# Altium footprint library Altium_Box_Header.PcbLib: 219 footprints (part 14 of 14)
Each footprint in its own frame and in the unit in brackets; x right, y up, seen from the top. Pads: shape width x height; smd on the part's side, far side on the other; paste and mask are expansions set on the pad; w line width, h text height; cw(c..) or ccw(c..) is an arc to the next point about the centre after c.
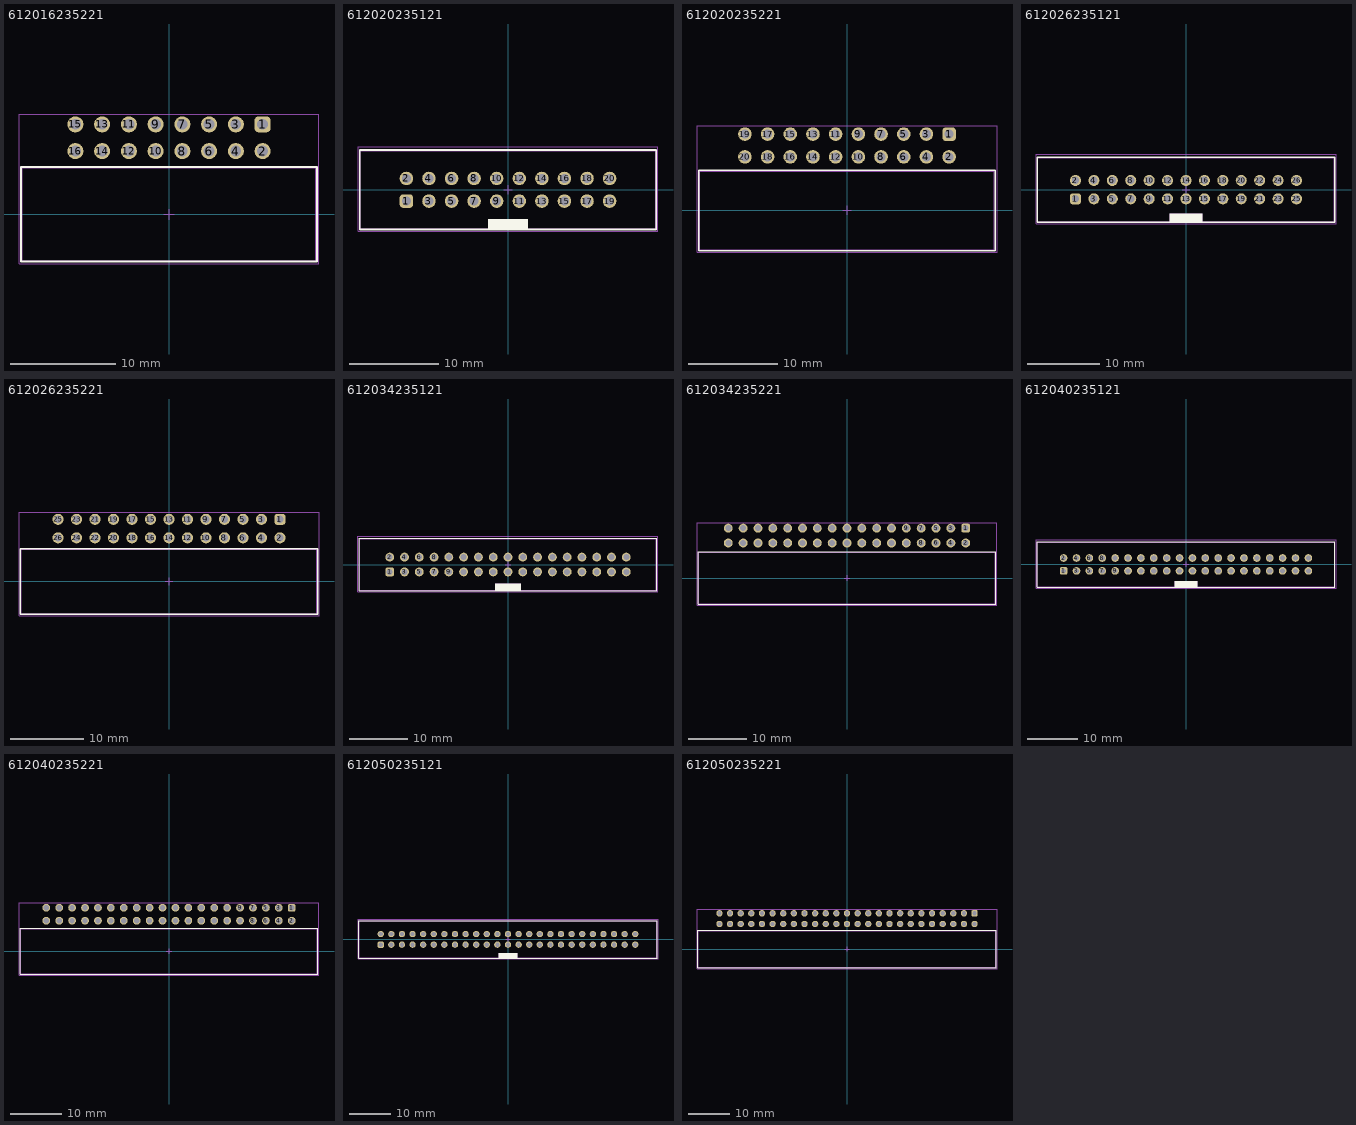
[diagram p13: the footprints below, top view; thin cyan lines are the x and y axes]

## 612016235221 [mm] "16 pins, right angled, gold plating, High Temperature"
height 9.05
pads (16):
  rrect50% 1.52x1.52 hole 1.02: 1(8.89,8.54)
  round 1.52 hole 1.02: 2(8.89,6) 3(6.35,8.54) 4(6.35,6) 5(3.81,8.54) 6(3.81,6) 7(1.27,8.54) 8(1.27,6) 9(-1.27,8.54) 10(-1.27,6) 11(-3.81,8.54) 12(-3.81,6) 13(-6.35,8.54) 14(-6.35,6) 15(-8.89,8.54) 16(-8.89,6)
Top Overlay:
  lines w0.2: -14.05,-4.5 -14.05,4.5 14.05,4.5 14.05,-4.5 -14.05,-4.5
Top Designator:
  text ".Designator" at -7.498,-0.5 h1.5
Top Component Outline:
  lines w0.1: -13.95,-4.4 13.95,-4.4 13.95,4.4 -13.95,4.4 -13.95,-4.4
Top 3D Body:
  lines w0.1: -13.95,-4.4 -13.95,4.4 13.95,4.4 13.95,-4.4 -13.95,-4.4
Top Courtyard:
  lines w0.05: -14.25,-4.7 14.25,-4.7 14.25,9.5 -14.25,9.5 -14.25,-4.7
Top Component Center:
  lines w0.05: -0.5,0 0.5,0 ; 0,-0.5 0,0.5
3D body "612016235221.stp": height 9.1, standoff -3.1, extent -13.99,-4.4 13.99,8.86

## 612020235121 [mm] "20 pins, straight, gold plating"
height 9.05
pads (20):
  rrect50% 1.52x1.52 hole 1.02: 1(-11.43,-1.27)
  round 1.52 hole 1.02: 2(-11.43,1.27) 3(-8.89,-1.27) 4(-8.89,1.27) 5(-6.35,-1.27) 6(-6.35,1.27) 7(-3.81,-1.27) 8(-3.81,1.27) 9(-1.27,-1.27) 10(-1.27,1.27) 11(1.27,-1.27) 12(1.27,1.27) 13(3.81,-1.27) 14(3.81,1.27) 15(6.35,-1.27) 16(6.35,1.27) 17(8.89,-1.27) 18(8.89,1.27) 19(11.43,-1.27) 20(11.43,1.27)
Top Overlay:
  rectangle: -2.25,-4.475 2.25,-3.275
  lines w0.2: -16.675,-4.475 16.675,-4.475 16.675,4.475 -16.675,4.475 -16.675,-4.475
Top Designator:
  text ".Designator" at -7.498,-0.5 h1.5
Top Component Outline:
  rectangle: -2.25,-4.4 2.25,-3.275
  lines w0.1: -16.6,-4.4 16.6,-4.4 16.6,4.4 -16.6,4.4 -16.6,-4.4
Top 3D Body:
  rectangle: -2.25,-4.4 2.25,-3.275
  lines w0.1: -16.6,-4.4 -16.6,4.4 16.6,4.4 16.6,-4.4 -16.6,-4.4
Top Courtyard:
  lines w0.05: -16.875,-4.675 16.875,-4.675 16.875,4.85 -16.875,4.85 -16.875,-4.675
Top Component Center:
  lines w0.05: -0.5,0 0.5,0 ; 0,-0.5 0,0.5
3D body "612020235121.stp": height 9.1, standoff -2.9, extent -16.53,-4.4 16.53,4.65

## 612020235221 [mm] "20 pins, right angled, gold plating, High Temperature"
height 9.05
pads (20):
  rrect50% 1.52x1.52 hole 1.02: 1(11.43,8.54)
  round 1.52 hole 1.02: 2(11.43,6) 3(8.89,8.54) 4(8.89,6) 5(6.35,8.54) 6(6.35,6) 7(3.81,8.54) 8(3.81,6) 9(1.27,8.54) 10(1.27,6) 11(-1.27,8.54) 12(-1.27,6) 13(-3.81,8.54) 14(-3.81,6) 15(-6.35,8.54) 16(-6.35,6) 17(-8.89,8.54) 18(-8.89,6) 19(-11.43,8.54) 20(-11.43,6)
Top Overlay:
  lines w0.2: -16.59,-4.5 16.59,-4.5 16.59,4.5 -16.59,4.5 -16.59,-4.5
Top Designator:
  text ".Designator" at -7.498,-0.5 h1.5
Top Component Outline:
  lines w0.1: -16.49,-4.4 -16.49,4.4 16.49,4.4 16.49,-4.4 -16.49,-4.4
Top 3D Body:
  lines w0.1: -16.49,-4.4 16.49,-4.4 16.49,4.4 -16.49,4.4 -16.49,-4.4
Top Courtyard:
  lines w0.05: -16.79,-4.7 -16.79,9.5 16.79,9.5 16.79,-4.7 -16.79,-4.7
Top Component Center:
  lines w0.05: -0.5,0 0.5,0 ; 0,-0.5 0,0.5
3D body "612020235221.stp": height 9.1, standoff -3.1, extent -16.53,-4.4 16.53,8.86

## 612026235121 [mm] "26 pins, straight, gold plating"
height 9.05
pads (26):
  rrect50% 1.52x1.52 hole 1.02: 1(-15.24,-1.27)
  round 1.52 hole 1.02: 2(-15.24,1.27) 3(-12.7,-1.27) 4(-12.7,1.27) 5(-10.16,-1.27) 6(-10.16,1.27) 7(-7.62,-1.27) 8(-7.62,1.27) 9(-5.08,-1.27) 10(-5.08,1.27) 11(-2.54,-1.27) 12(-2.54,1.27) 13(0,-1.27) 14(0,1.27) 15(2.54,-1.27) 16(2.54,1.27) 17(5.08,-1.27) 18(5.08,1.27) 19(7.62,-1.27) 20(7.62,1.27) 21(10.16,-1.27) 22(10.16,1.27) 23(12.7,-1.27) 24(12.7,1.27) 25(15.24,-1.27) 26(15.24,1.27)
Top Overlay:
  rectangle: -2.25,-4.475 2.25,-3.275
  lines w0.2: -20.485,-4.475 20.485,-4.475 20.485,4.475 -20.485,4.475 -20.485,-4.475
Top Designator:
  text ".Designator" at -7.498,-0.5 h1.5
Top Component Outline:
  rectangle: -2.25,-4.4 2.25,-3.275
  lines w0.1: -20.41,-4.4 20.41,-4.4 20.41,4.4 -20.41,4.4 -20.41,-4.4
Top 3D Body:
  rectangle: -2.25,-4.4 2.25,-3.275
  lines w0.1: -20.41,-4.4 -20.41,4.4 20.41,4.4 20.41,-4.4 -20.41,-4.4
Top Courtyard:
  lines w0.05: -20.685,-4.675 20.685,-4.675 20.685,4.85 -20.685,4.85 -20.685,-4.675
Top Component Center:
  lines w0.05: -0.5,0 0.5,0 ; 0,-0.5 0,0.5
3D body "612026235121.stp": height 9.1, standoff -2.9, extent -20.34,-4.4 20.34,4.65

## 612026235221 [mm] "26 pins, right angled, gold plating, High Temperature"
height 9.05
pads (26):
  rrect50% 1.52x1.52 hole 1.02: 1(15.24,8.54)
  round 1.52 hole 1.02: 2(15.24,6) 3(12.7,8.54) 4(12.7,6) 5(10.16,8.54) 6(10.16,6) 7(7.62,8.54) 8(7.62,6) 9(5.08,8.54) 10(5.08,6) 11(2.54,8.54) 12(2.54,6) 13(0,8.54) 14(0,6) 15(-2.54,8.54) 16(-2.54,6) 17(-5.08,8.54) 18(-5.08,6) 19(-7.62,8.54) 20(-7.62,6) 21(-10.16,8.54) 22(-10.16,6) 23(-12.7,8.54) 24(-12.7,6) 25(-15.24,8.54) 26(-15.24,6)
Top Overlay:
  lines w0.2: -20.4,-4.5 -20.4,4.5 20.4,4.5 20.4,-4.5 -20.4,-4.5
Top Designator:
  text ".Designator" at -7.498,-0.5 h1.5
Top Component Outline:
  lines w0.1: -20.3,-4.4 20.3,-4.4 20.3,4.4 -20.3,4.4 -20.3,-4.4
Top 3D Body:
  lines w0.1: -20.3,-4.4 -20.3,4.4 20.3,4.4 20.3,-4.4 -20.3,-4.4
Top Courtyard:
  lines w0.05: -20.6,-4.7 20.6,-4.7 20.6,9.5 -20.6,9.5 -20.6,-4.7
Top Component Center:
  lines w0.05: -0.5,0 0.5,0 ; 0,-0.5 0,0.5
3D body "612026235221.stp": height 9.1, standoff -3.1, extent -20.34,-4.4 20.34,8.86

## 612034235121 [mm] "34 pins, straight, gold plating"
height 9.05
pads (34):
  rrect50% 1.52x1.52 hole 1.02: 1(-20.32,-1.27)
  round 1.52 hole 1.02: 2(-20.32,1.27) 3(-17.78,-1.27) 4(-17.78,1.27) 5(-15.24,-1.27) 6(-15.24,1.27) 7(-12.7,-1.27) 8(-12.7,1.27) 9(-10.16,-1.27) 10(-10.16,1.27) 11(-7.62,-1.27) 12(-7.62,1.27) 13(-5.08,-1.27) 14(-5.08,1.27) 15(-2.54,-1.27) 16(-2.54,1.27) 17(0,-1.27) 18(0,1.27) 19(2.54,-1.27) 20(2.54,1.27) 21(5.08,-1.27) 22(5.08,1.27) 23(7.62,-1.27) 24(7.62,1.27) 25(10.16,-1.27) 26(10.16,1.27) 27(12.7,-1.27) 28(12.7,1.27) 29(15.24,-1.27) 30(15.24,1.27) 31(17.78,-1.27) 32(17.78,1.27) 33(20.32,-1.27) 34(20.32,1.27)
Top Overlay:
  rectangle: -2.25,-4.475 2.25,-3.275
  lines w0.2: -25.565,-4.475 25.565,-4.475 25.565,4.475 -25.565,4.475 -25.565,-4.475
Top Designator:
  text ".Designator" at -7.498,-0.5 h1.5
Top Component Outline:
  rectangle: -2.25,-4.4 2.25,-3.275
  lines w0.1: -25.49,-4.4 25.49,-4.4 25.49,4.4 -25.49,4.4 -25.49,-4.4
Top 3D Body:
  rectangle: -2.25,-4.4 2.25,-3.275
  lines w0.1: -25.49,-4.4 -25.49,4.4 25.49,4.4 25.49,-4.4 -25.49,-4.4
Top Courtyard:
  lines w0.05: -25.765,-4.675 25.765,-4.675 25.765,4.85 -25.765,4.85 -25.765,-4.675
Top Component Center:
  lines w0.05: -0.5,0 0.5,0 ; 0,-0.5 0,0.5
3D body "612034235121.stp": height 9.1, standoff -2.9, extent -25.42,-4.4 25.42,4.65

## 612034235221 [mm] "34 pins, right angled, gold plating, High Temperature"
height 9.05
pads (34):
  rrect50% 1.52x1.52 hole 1.02: 1(20.32,8.54)
  round 1.52 hole 1.02: 2(20.32,6) 3(17.78,8.54) 4(17.78,6) 5(15.24,8.54) 6(15.24,6) 7(12.7,8.54) 8(12.7,6) 9(10.16,8.54) 10(10.16,6) 11(7.62,8.54) 12(7.62,6) 13(5.08,8.54) 14(5.08,6) 15(2.54,8.54) 16(2.54,6) 17(0,8.54) 18(0,6) 19(-2.54,8.54) 20(-2.54,6) 21(-5.08,8.54) 22(-5.08,6) 23(-7.62,8.54) 24(-7.62,6) 25(-10.16,8.54) 26(-10.16,6) 27(-12.7,8.54) 28(-12.7,6) 29(-15.24,8.54) 30(-15.24,6) 31(-17.78,8.54) 32(-17.78,6) 33(-20.32,8.54) 34(-20.32,6)
Top Overlay:
  lines w0.2: -25.48,-4.5 -25.48,4.5 25.48,4.5 25.48,-4.5 -25.48,-4.5
Top Designator:
  text ".Designator" at -7.498,-0.5 h1.5
Top Component Outline:
  lines w0.1: -25.38,-4.4 25.38,-4.4 25.38,4.4 -25.38,4.4 -25.38,-4.4
Top 3D Body:
  lines w0.1: -25.38,-4.4 -25.38,4.4 25.38,4.4 25.38,-4.4 -25.38,-4.4
Top Courtyard:
  lines w0.05: -25.68,-4.7 25.68,-4.7 25.68,9.5 -25.68,9.5 -25.68,-4.7
Top Component Center:
  lines w0.05: -0.5,0 0.5,0 ; 0,-0.5 0,0.5
3D body "612034235221.stp": height 9.1, standoff -3.1, extent -25.42,-4.4 25.42,8.86

## 612040235121 [mm] "40 pins, straight, gold plating"
height 9.05
pads (40):
  rrect50% 1.52x1.52 hole 1.02: 1(-24.13,-1.27)
  round 1.52 hole 1.02: 2(-24.13,1.27) 3(-21.59,-1.27) 4(-21.59,1.27) 5(-19.05,-1.27) 6(-19.05,1.27) 7(-16.51,-1.27) 8(-16.51,1.27) 9(-13.97,-1.27) 10(-13.97,1.27) 11(-11.43,-1.27) 12(-11.43,1.27) 13(-8.89,-1.27) 14(-8.89,1.27) 15(-6.35,-1.27) 16(-6.35,1.27) 17(-3.81,-1.27) 18(-3.81,1.27) 19(-1.27,-1.27) 20(-1.27,1.27) 21(1.27,-1.27) 22(1.27,1.27) 23(3.81,-1.27) 24(3.81,1.27) 25(6.35,-1.27) 26(6.35,1.27) 27(8.89,-1.27) 28(8.89,1.27) 29(11.43,-1.27) 30(11.43,1.27) 31(13.97,-1.27) 32(13.97,1.27) 33(16.51,-1.27) 34(16.51,1.27) 35(19.05,-1.27) 36(19.05,1.27) 37(21.59,-1.27) 38(21.59,1.27) 39(24.13,-1.27) 40(24.13,1.27)
Top Overlay:
  rectangle: -2.25,-4.475 2.25,-3.275
  lines w0.2: -29.375,-4.475 29.375,-4.475 29.375,4.475 -29.375,4.475 -29.375,-4.475
Top Designator:
  text ".Designator" at -7.498,-0.5 h1.5
Top Component Outline:
  rectangle: -2.25,-4.4 2.25,-3.275
  lines w0.1: -29.3,-4.4 29.3,-4.4 29.3,4.4 -29.3,4.4 -29.3,-4.4
Top 3D Body:
  rectangle: -2.25,-4.4 2.25,-3.275
  lines w0.1: -29.3,-4.4 -29.3,4.4 29.3,4.4 29.3,-4.4 -29.3,-4.4
Top Courtyard:
  lines w0.05: -29.575,-4.675 29.575,-4.675 29.575,4.85 -29.575,4.85 -29.575,-4.675
Top Component Center:
  lines w0.05: -0.5,0 0.5,0 ; 0,-0.5 0,0.5
3D body "612040235121.stp": height 9.1, standoff -2.9, extent -29.23,-4.4 29.23,4.65

## 612040235221 [mm] "40 pins, right angled, gold plating, High Temperature"
height 9.05
pads (40):
  rrect50% 1.52x1.52 hole 1.02: 1(24.13,8.54)
  round 1.52 hole 1.02: 2(24.13,6) 3(21.59,8.54) 4(21.59,6) 5(19.05,8.54) 6(19.05,6) 7(16.51,8.54) 8(16.51,6) 9(13.97,8.54) 10(13.97,6) 11(11.43,8.54) 12(11.43,6) 13(8.89,8.54) 14(8.89,6) 15(6.35,8.54) 16(6.35,6) 17(3.81,8.54) 18(3.81,6) 19(1.27,8.54) 20(1.27,6) 21(-1.27,8.54) 22(-1.27,6) 23(-3.81,8.54) 24(-3.81,6) 25(-6.35,8.54) 26(-6.35,6) 27(-8.89,8.54) 28(-8.89,6) 29(-11.43,8.54) 30(-11.43,6) 31(-13.97,8.54) 32(-13.97,6) 33(-16.51,8.54) 34(-16.51,6) 35(-19.05,8.54) 36(-19.05,6) 37(-21.59,8.54) 38(-21.59,6) 39(-24.13,8.54) 40(-24.13,6)
Top Overlay:
  lines w0.2: -29.29,-4.5 -29.29,4.5 29.29,4.5 29.29,-4.5 -29.29,-4.5
Top Designator:
  text ".Designator" at -7.498,-0.5 h1.5
Top Component Outline:
  lines w0.1: -29.19,-4.4 29.19,-4.4 29.19,4.4 -29.19,4.4 -29.19,-4.4
Top 3D Body:
  lines w0.1: -29.19,-4.4 -29.19,4.4 29.19,4.4 29.19,-4.4 -29.19,-4.4
Top Courtyard:
  lines w0.05: -29.49,-4.7 29.49,-4.7 29.49,9.5 -29.49,9.5 -29.49,-4.7
Top Component Center:
  lines w0.05: -0.5,0 0.5,0 ; 0,-0.5 0,0.5
3D body "612040235221.stp": height 9.1, standoff -3.1, extent -29.23,-4.4 29.23,8.86

## 612050235121 [mm] "50 pins, straight, gold plating"
height 9.05
pads (50):
  rrect50% 1.52x1.52 hole 1.02: 1(-30.48,-1.27)
  round 1.52 hole 1.02: 2(-30.48,1.27) 3(-27.94,-1.27) 4(-27.94,1.27) 5(-25.4,-1.27) 6(-25.4,1.27) 7(-22.86,-1.27) 8(-22.86,1.27) 9(-20.32,-1.27) 10(-20.32,1.27) 11(-17.78,-1.27) 12(-17.78,1.27) 13(-15.24,-1.27) 14(-15.24,1.27) 15(-12.7,-1.27) 16(-12.7,1.27) 17(-10.16,-1.27) 18(-10.16,1.27) 19(-7.62,-1.27) 20(-7.62,1.27) 21(-5.08,-1.27) 22(-5.08,1.27) 23(-2.54,-1.27) 24(-2.54,1.27) 25(0,-1.27) 26(0,1.27) 27(2.54,-1.27) 28(2.54,1.27) 29(5.08,-1.27) 30(5.08,1.27) 31(7.62,-1.27) 32(7.62,1.27) 33(10.16,-1.27) 34(10.16,1.27) 35(12.7,-1.27) 36(12.7,1.27) 37(15.24,-1.27) 38(15.24,1.27) 39(17.78,-1.27) 40(17.78,1.27) 41(20.32,-1.27) 42(20.32,1.27) 43(22.86,-1.27) 44(22.86,1.27) 45(25.4,-1.27) 46(25.4,1.27) 47(27.94,-1.27) 48(27.94,1.27) 49(30.48,-1.27) 50(30.48,1.27)
Top Overlay:
  rectangle: -2.25,-4.475 2.25,-3.275
  lines w0.2: -35.725,-4.475 35.725,-4.475 35.725,4.475 -35.725,4.475 -35.725,-4.475
Top Designator:
  text ".Designator" at -7.498,-0.5 h1.5
Top Component Outline:
  rectangle: -2.25,-4.4 2.25,-3.275
  lines w0.1: -35.65,-4.4 35.65,-4.4 35.65,4.4 -35.65,4.4 -35.65,-4.4
Top 3D Body:
  rectangle: -2.25,-4.4 2.25,-3.275
  lines w0.1: -35.65,-4.4 -35.65,4.4 35.65,4.4 35.65,-4.4 -35.65,-4.4
Top Courtyard:
  lines w0.05: -35.925,-4.675 35.925,-4.675 35.925,4.85 -35.925,4.85 -35.925,-4.675
Top Component Center:
  lines w0.05: -0.5,0 0.5,0 ; 0,-0.5 0,0.5
3D body "612050235121.stp": height 9.1, standoff -2.9, extent -35.58,-4.4 35.58,4.65

## 612050235221 [mm] "50 pins, right angled, gold plating, High Temperature"
height 9.05
pads (50):
  rrect50% 1.52x1.52 hole 1.02: 1(30.48,8.54)
  round 1.52 hole 1.02: 2(30.48,6) 3(27.94,8.54) 4(27.94,6) 5(25.4,8.54) 6(25.4,6) 7(22.86,8.54) 8(22.86,6) 9(20.32,8.54) 10(20.32,6) 11(17.78,8.54) 12(17.78,6) 13(15.24,8.54) 14(15.24,6) 15(12.7,8.54) 16(12.7,6) 17(10.16,8.54) 18(10.16,6) 19(7.62,8.54) 20(7.62,6) 21(5.08,8.54) 22(5.08,6) 23(2.54,8.54) 24(2.54,6) 25(0,8.54) 26(0,6) 27(-2.54,8.54) 28(-2.54,6) 29(-5.08,8.54) 30(-5.08,6) 31(-7.62,8.54) 32(-7.62,6) 33(-10.16,8.54) 34(-10.16,6) 35(-12.7,8.54) 36(-12.7,6) 37(-15.24,8.54) 38(-15.24,6) 39(-17.78,8.54) 40(-17.78,6) 41(-20.32,8.54) 42(-20.32,6) 43(-22.86,8.54) 44(-22.86,6) 45(-25.4,8.54) 46(-25.4,6) 47(-27.94,8.54) 48(-27.94,6) 49(-30.48,8.54) 50(-30.48,6)
Top Overlay:
  lines w0.2: -35.64,-4.5 -35.64,4.5 35.64,4.5 35.64,-4.5 -35.64,-4.5
Top Designator:
  text ".Designator" at -7.498,-0.5 h1.5
Top Component Outline:
  lines w0.1: -35.54,-4.4 35.54,-4.4 35.54,4.4 -35.54,4.4 -35.54,-4.4
Top 3D Body:
  lines w0.1: -35.54,-4.4 -35.54,4.4 35.54,4.4 35.54,-4.4 -35.54,-4.4
Top Courtyard:
  lines w0.05: -35.84,-4.7 35.84,-4.7 35.84,9.5 -35.84,9.5 -35.84,-4.7
Top Component Center:
  lines w0.05: -0.5,0 0.5,0 ; 0,-0.5 0,0.5
3D body "612050235221.stp": height 9.1, standoff -3.1, extent -35.58,-4.4 35.58,8.86